# Altium footprint library WE-PD_1210.PcbLib: 1 footprints
Each footprint in its own frame and in the unit in brackets; x right, y up, seen from the top. Pads: shape width x height; smd on the part's side, far side on the other; paste and mask are expansions set on the pad; w line width, h text height; cw(c..) or ccw(c..) is an arc to the next point about the centre after c.
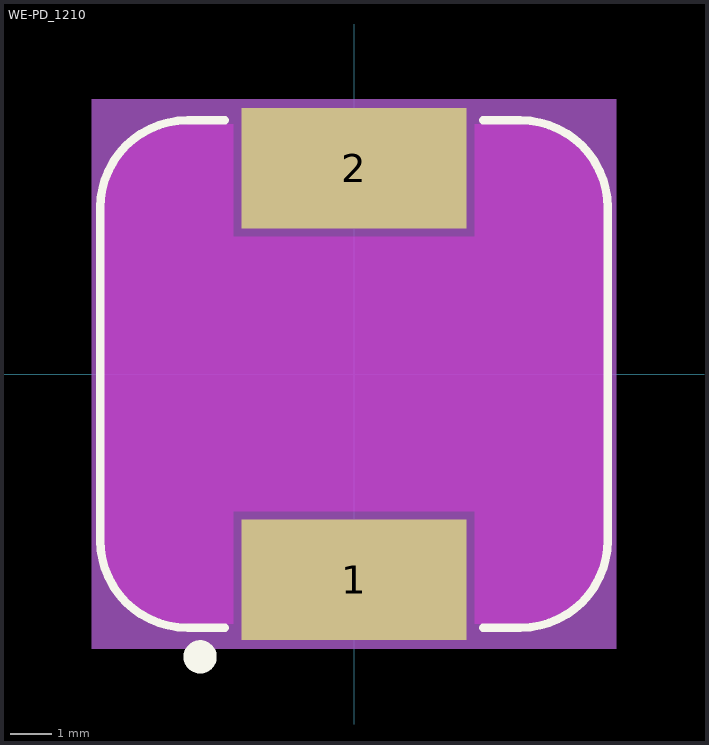
[diagram p0: the footprint, top view; thin cyan lines are the x and y axes]

## WE-PD_1210 [mm]
pads (2):
  rect 5.4x2.9 smd: 1(0,-4.95) 2(0,4.95)
Top Overlay:
  circle w0.4: c-3.7,-6.8 r0.2
  lines w0.2: -3.1,-6.1 -4,-6.1 cw(c-4,-4) -6.1,-4 -6.1,4 ; -3.1,6.1 -4,6.1 ; 3.1,-6.1 4,-6.1 ccw(c4,-4) 6.1,-4 6.1,4 ccw(c4,4) 4,6.1 3.1,6.1 ; -6.1,4 cw(c-4,4) -4,6.1 ; -6.1,4 cw(c-4,4) -4,6.1
Keep-Out Layer:
  region: 4.105,5.997 4.209,5.989 4.313,5.975 4.416,5.956 4.518,5.932 4.618,5.902 4.717,5.867 4.813,5.827 4.908,5.782 5,5.732 5.089,5.677 5.176,5.618 5.259,5.554 5.338,5.486 5.414,5.414 5.486,5.338 5.554,5.259 5.618,5.176 5.677,5.089 5.732,5 5.782,4.908 5.827,4.813 5.867,4.717 5.902,4.618 5.932,4.518 5.956,4.416 5.975,4.313 5.989,4.209 5.997,4.105 6,4 6,-4 5.997,-4.105 5.989,-4.209 5.975,-4.313 5.956,-4.416 5.932,-4.518 5.902,-4.618 5.867,-4.717 5.827,-4.813 5.782,-4.908 5.732,-5 5.677,-5.089 5.618,-5.176 5.554,-5.259 5.486,-5.338 5.414,-5.414 5.338,-5.486 5.259,-5.554 5.176,-5.618 5.089,-5.677 5,-5.732 4.908,-5.782 4.813,-5.827 4.717,-5.867 4.618,-5.902 4.518,-5.932 4.416,-5.956 4.313,-5.975 4.209,-5.989 4.105,-5.997 4,-6 2.9,-6 2.9,-3.3 -2.9,-3.3 -2.9,-6 -4,-6 -4.105,-5.997 -4.209,-5.989 -4.313,-5.975 -4.416,-5.956 -4.518,-5.932 -4.618,-5.902 -4.717,-5.867 -4.813,-5.827 -4.908,-5.782 -5,-5.732 -5.089,-5.677 -5.176,-5.618 -5.259,-5.554 -5.338,-5.486 -5.414,-5.414 -5.486,-5.338 -5.554,-5.259 -5.618,-5.176 -5.677,-5.089 -5.732,-5 -5.782,-4.908 -5.827,-4.813 -5.867,-4.717 -5.902,-4.618 -5.932,-4.518 -5.956,-4.416 -5.975,-4.313 -5.989,-4.209 -5.997,-4.105 -6,-4 -6,4 -5.997,4.105 -5.989,4.209 -5.975,4.313 -5.956,4.416 -5.932,4.518 -5.902,4.618 -5.867,4.717 -5.827,4.813 -5.782,4.908 -5.732,5 -5.677,5.089 -5.618,5.176 -5.554,5.259 -5.486,5.338 -5.414,5.414 -5.338,5.486 -5.259,5.554 -5.176,5.618 -5.089,5.677 -5,5.732 -4.908,5.782 -4.813,5.827 -4.717,5.867 -4.618,5.902 -4.518,5.932 -4.416,5.956 -4.313,5.975 -4.209,5.989 -4.105,5.997 -4,6 -2.9,6 -2.9,3.3 2.9,3.3 2.9,6 4,6
Assembly Top:
  circle w0.5: c-4.5,-4.5 r0.25
  lines w0.1: -6,-4 ccw(c-4,-4) -4,-6 4,-6 ccw(c4,-4) 6,-4 6,4 ccw(c4,4) 4,6 -4,6 ccw(c-4,4) -6,4 -6,-4
Courtyard Top:
  region: 6.3,-6.6 -6.3,-6.6 -6.3,6.6 6.3,6.6
3D body "step_temp.STEP": height 6, standoff -6, extent -6,-9.26 6,0.2